# EAGLE library part MSP-FET-JTAG (library madhu)
TI MSP-FET 14-Pin JTAG Connector
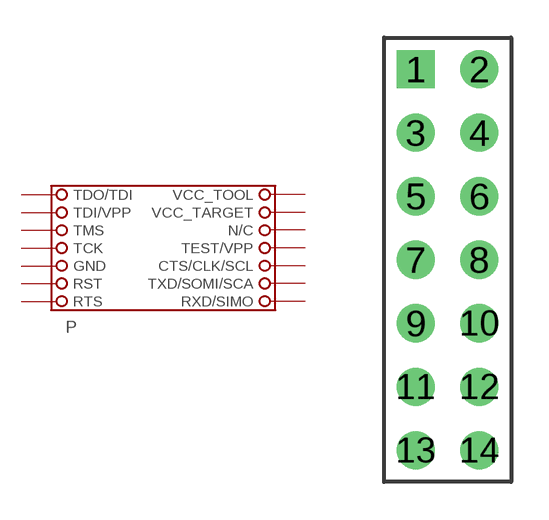
[diagram p20: symbol with the pads of HEADER-14; footprint HEADER-14]

Designator prefix P

## MSP-FET-JTAG  [HEADER-14]
1  TDO/TDI
2  VCC_TOOL
3  TDI/VPP
4  VCC_TARGET
5  TMS
6  N/C
7  TCK
8  TEST/VPP
9  GND
10  CTS/CLK/SCL
11  RST
12  TXD/SOMI/SCA
13  RTS
14  RXD/SIMO

## Footprint HEADER-14 (pad centres in mm)
14 pin header grid 2.5 mm, outline 2.4 x 4.4 mm
drill 1.016 square: 1 -1.27,2.54
drill 1.016: 2 1.27,2.54; 3 -1.27,0; 4 1.27,0; 5 -1.27,-2.54; 6 1.27,-2.54; 7 -1.27,-5.08; 8 1.27,-5.08; 9 -1.27,-7.62; 10 1.27,-7.62; 11 -1.27,-10.16; 12 1.27,-10.16; 13 -1.27,-12.7; 14 1.27,-12.7